# Altium schematic symbol library Resistor.SchLib: 1085 symbols (part 29 of 29)
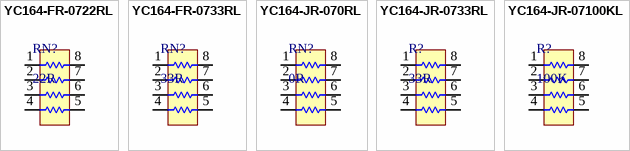
[diagram p55: symbols YC164-FR-0722RL to YC164-JR-07100KL]

## YC164-FR-0733RL
designator RN?, comment 33R
RES ARRAY 4 RES 33 OHM 1206; Manufacturer: Yageo; Manufacturer Part Number: YC164-FR-0733RL; Tolerance: 1%; Voltage Rating: 50V; Number of Elements: 4; Circuit Type: Isolated; Power Per Element: 62.5mW; Temperature Coefficient: 200ppm/°C; Item Type: Resistor Array; Supplier 1: Arrow Electronics; RoHS: Yes; Category: Resistor Arrays; Stock 1: 30000; Pricing 1: 5000=0.01 (USD); Mounting Technology: Surface Mount; Pins: 8; Case Code (Metric): 3216; Case Code (Imperial): 1206; Min Operating Temperature: -55°C; Max Operating Temperature: 155°C; Value: 33R; Packaging: Tape and Reel; Number of Resistors: 4; Number of Circuits: 4; Series: YC164; Resistance Tolerance: 1%; Length: 0.126inch; Width: 0.063inch; Height: 0.028inch; Radiation Hardening: No; Lead Free: Lead Free; RoHS Compliant: Yes; Reach SVHC Compliant: Unknown; ComponentLink1URL: https://datasheet.ciiva.com/8017/443424-8017949.pdf?src-supplier=Element14; ComponentLink1Description: https://datasheet.ciiva.com/8017/443424-8017949.pdf?src-supplier=Element14; ComponentLink2URL: https://datasheet.ciiva.com/8017/443424-8017948.pdf?src-supplier=Element14; ComponentLink2Description: https://datasheet.ciiva.com/8017/443424-8017948.pdf?src-supplier=Element14; ComponentLink3URL: https://datasheet.ciiva.com/8311/pyu-yc-tc164-51-rohs-l-3-8311992.pdf?src-supplier=Avnet; ComponentLink3Description: https://datasheet.ciiva.com/8311/pyu-yc-tc164-51-rohs-l-3-8311992.pdf?src-supplier=Avnet; Supplier Part Number 1: YC164-FR-0733RL; LCSC Part Number: C309681
footprint YC164-FR-0733RL
pins: 1, 2, 3, 4, 5, 6, 7, 8

## YC164-JR-070RL
designator RN?, comment 0R
4 0Ω 62.5mW ±200ppm/℃ 0603x4 Resistor Networks & Arrays ROHS; Manufacturer: YAGEO; Manufacturer Part Number: YC164-JR-070RL; Item Type: Resistor Array; Package: 0603x4; LCSC Part Number: C327053; ComponentLink1Description: LCSC; ComponentLink1URL: https://www.lcsc.com/product-detail/Resistor-Networks-Arrays_YAGEO-YC164-JR-070RL_C327053.html
footprint YC164-JR-070RL
pins: 1, 2, 3, 4, 5, 6, 7, 8

## YC164-JR-0733RL
designator R?, comment 33R
RES ARRAY 4 RES 33 OHM 1206; Manufacturer: Yageo; Manufacturer Part Number: YC164-JR-0733RL; Item Type: Resistor Array; Supplier: Future Electronics; Supplier Part Number: 1128537; RoHS: Yes; Category: Resistor Arrays; Stock: 530000; Pricing: 5000=0.0065, 20000=0.0062, 75000=0.0059, 125000=0.0058, 250000=0.0054 (USD); ComponentLink1URL: https://datasheet.ciiva.com/2688/pyu-yc-tc164-51-rohs-l-3-2688397.pdf?src-supplier=Digi-Key; ComponentLink1Description: https://datasheet.ciiva.com/2688/pyu-yc-tc164-51-rohs-l-3-2688397.pdf?src-supplier=Digi-Key; ComponentLink2URL: https://datasheet.ciiva.com/2688/pyu-yc-tc164-51-rohs-l-3-2688398.pdf?src-supplier=Digi-Key; ComponentLink2Description: https://datasheet.ciiva.com/2688/pyu-yc-tc164-51-rohs-l-3-2688398.pdf?src-supplier=Digi-Key; ComponentLink3URL: https://datasheet.ciiva.com/2688/pyu-yc-tc164-51-rohs-l-3-2688399.pdf?src-supplier=Digi-Key; ComponentLink3Description: https://datasheet.ciiva.com/2688/pyu-yc-tc164-51-rohs-l-3-2688399.pdf?src-supplier=Digi-Key; ComponentLink4URL: https://datasheet.ciiva.com/8320/pyu-yc-tc164-51-rohs-l-3-8320237.pdf?src-supplier=Avnet; ComponentLink4Description: https://datasheet.ciiva.com/8320/pyu-yc-tc164-51-rohs-l-3-8320237.pdf?src-supplier=Avnet; ComponentLink5URL: https://datasheet.ciiva.com/8018/443424-8018013.pdf?src-supplier=Element14; ComponentLink5Description: https://datasheet.ciiva.com/8018/443424-8018013.pdf?src-supplier=Element14; ComponentLink6URL: https://datasheet.ciiva.com/8018/443424-8018014.pdf?src-supplier=Element14; ComponentLink6Description: https://datasheet.ciiva.com/8018/443424-8018014.pdf?src-supplier=Element14; LCSC Part Number: C165956
footprint YC164-JR-0733RL
pins: 1, 2, 3, 4, 5, 6, 7, 8

## YC164-JR-07100KL
designator R?, comment 100K
RES ARRAY 4 RES 100K OHM 1206; Manufacturer: Yageo; Manufacturer Part Number: YC164-JR-07100KL; Item Type: Resistor; Supplier: Future Electronics; Supplier Part Number: 4734737; RoHS: Yes; Category: Resistor Arrays; Stock: 10000; Pricing: 5000=0.0086, 20000=0.0082, 50000=0.0078, 100000=0.0078, 125000=0.0075, 200000=0.0076, 625000=0.0071 (USD); ComponentLink1URL: https://datasheet.ciiva.com/11807/0900766b80c69e1d-11807026.pdf?src-supplier=Rs; ComponentLink1Description: https://datasheet.ciiva.com/11807/0900766b80c69e1d-11807026.pdf?src-supplier=Rs; ComponentLink2URL: https://datasheet.ciiva.com/8017/443424-8017993.pdf?src-supplier=Element14; ComponentLink2Description: https://datasheet.ciiva.com/8017/443424-8017993.pdf?src-supplier=Element14; ComponentLink3URL: https://datasheet.ciiva.com/8017/443424-8017994.pdf?src-supplier=Element14; ComponentLink3Description: https://datasheet.ciiva.com/8017/443424-8017994.pdf?src-supplier=Element14; ComponentLink4URL: https://datasheet.ciiva.com/17478/pyu-yc-tc164-51-rohs-l-3-17478885.pdf?src-supplier=Future+Electronics; ComponentLink4Description: https://datasheet.ciiva.com/17478/pyu-yc-tc164-51-rohs-l-3-17478885.pdf?src-supplier=Future+Electronics; ComponentLink5URL: https://datasheet.ciiva.com/2693/pyu-yc-tc164-51-rohs-l-3-2693249.pdf?src-supplier=Digi-Key; ComponentLink5Description: https://datasheet.ciiva.com/2693/pyu-yc-tc164-51-rohs-l-3-2693249.pdf?src-supplier=Digi-Key; ComponentLink6URL: https://datasheet.ciiva.com/2693/pyu-yc-tc164-51-rohs-l-3-2693250.pdf?src-supplier=Digi-Key; ComponentLink6Description: https://datasheet.ciiva.com/2693/pyu-yc-tc164-51-rohs-l-3-2693250.pdf?src-supplier=Digi-Key; ComponentLink7URL: https://datasheet.ciiva.com/2693/pyu-yc-tc164-51-rohs-l-3-2693251.pdf?src-supplier=Digi-Key; ComponentLink7Description: https://datasheet.ciiva.com/2693/pyu-yc-tc164-51-rohs-l-3-2693251.pdf?src-supplier=Digi-Key; LCSC Part Number: C192933
footprint YC164-JR-070RL
pins: 1, 2, 3, 4, 5, 6, 7, 8